# Altium schematic symbol library CC0805JRNPO9BN100.SchLib: 1 symbol
Pins are listed as number, name and electrical type; pins without a type are passive.

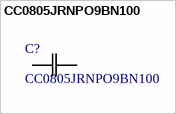
[diagram p0: symbol CC0805JRNPO9BN100]

## CC0805JRNPO9BN100
designator C?
Description; Manufacturer_Name: Yageo; Copyright: Copyright (C) 2026 Ultra Librarian. All rights reserved.; Manufacturer_Part_Number: CC0805JRNPO9BN100
footprint CAP_CC0805_YAG
pins: 1, 2